# EAGLE library part 6200XX21821_62000621821 (library WR-PHD)
WR-PHD 2.00 mm Dual Socket Header Article Properties Pins 4 unitless; 6 unitless; 8 unitless; 10 unitless; 14 unitless; 16 unitless; 20 unitless; 24 unitless; 28 unitless; 32 unitless; 40 unitless; 44 unitless General Information Operating Temperature -40 °C up to +105 °C Compliance Lead free / RoHS Pitch 2 mm Durability 50 Cycles Rows Dual Gender Socket Header Type Straight Material Properties Insulator Material PA9T Insulator Flammability Rating UL94 V-0 Contact Material Copper Alloy Contact Plating Gold Contact Type Stamped Certification UL Approval E323964 Packaging Properties Packaging Tube Electrical Properties IR 2 A Withstanding Voltage 500 V (AC) Contact Resistance 20 mΩ RISO 1000 MΩ <https://www.we-online.com/components/media/o33221v209%20Family_WR-PHD_6200xx21821.jpg> Details see: www.we-online.com/en/components/products/PHD_2_00_DUAL_SOCKET_HEADER_6200XX21821 <www.we-online.com/catalog/PHD_2_00_DUAL_SOCKET_HEADER_6200XX21821/?utm_source=eagle_model&utm_medium=description_link&utm_campaign=eisos_eagle> Updated by Ella 2024-02-27 2024 (C) Würth Elektronik
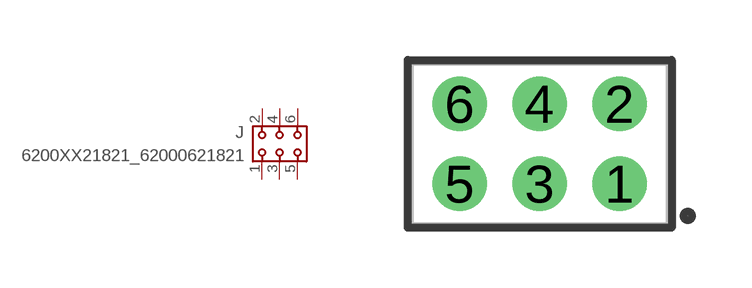
[diagram p347: symbol with the pads of 62000621821; footprint 62000621821]

Designator prefix J

## 6200XX21821_62000621821 (DATASHEET-URL: https://www.we-online.com/redexpert/spec/62000621821?ae; GENDER: Socket Header; IR: 2A; MOUNT: THT; PACKAGING: Tube; PART-NUMBER: 62000621821; PINS: 6; PITCH: 2.00 mm; ROWS: Dual; TYPE: Straight; VALUE: 62000621821)  [62000621821]
1  1  pas
2  2  pas
3  3  pas
4  4  pas
5  5  pas
6  6  pas

## Footprint 62000621821 (pad centres in mm)
WR-PHD 2.00 mm Dual Socket Header THT, 6 Pins
drill 0.85: 1 2,-1; 2 2,1; 3 0,-1; 4 0,1; 5 -2,-1; 6 -2,1